# Altium footprint library Amin-Library.PcbLib: 601 footprints (part 2 of 38)
Each footprint in its own frame and in the unit in brackets; x right, y up, seen from the top. Pads: shape width x height; smd on the part's side, far side on the other; paste and mask are expansions set on the pad; w line width, h text height; cw(c..) or ccw(c..) is an arc to the next point about the centre after c.
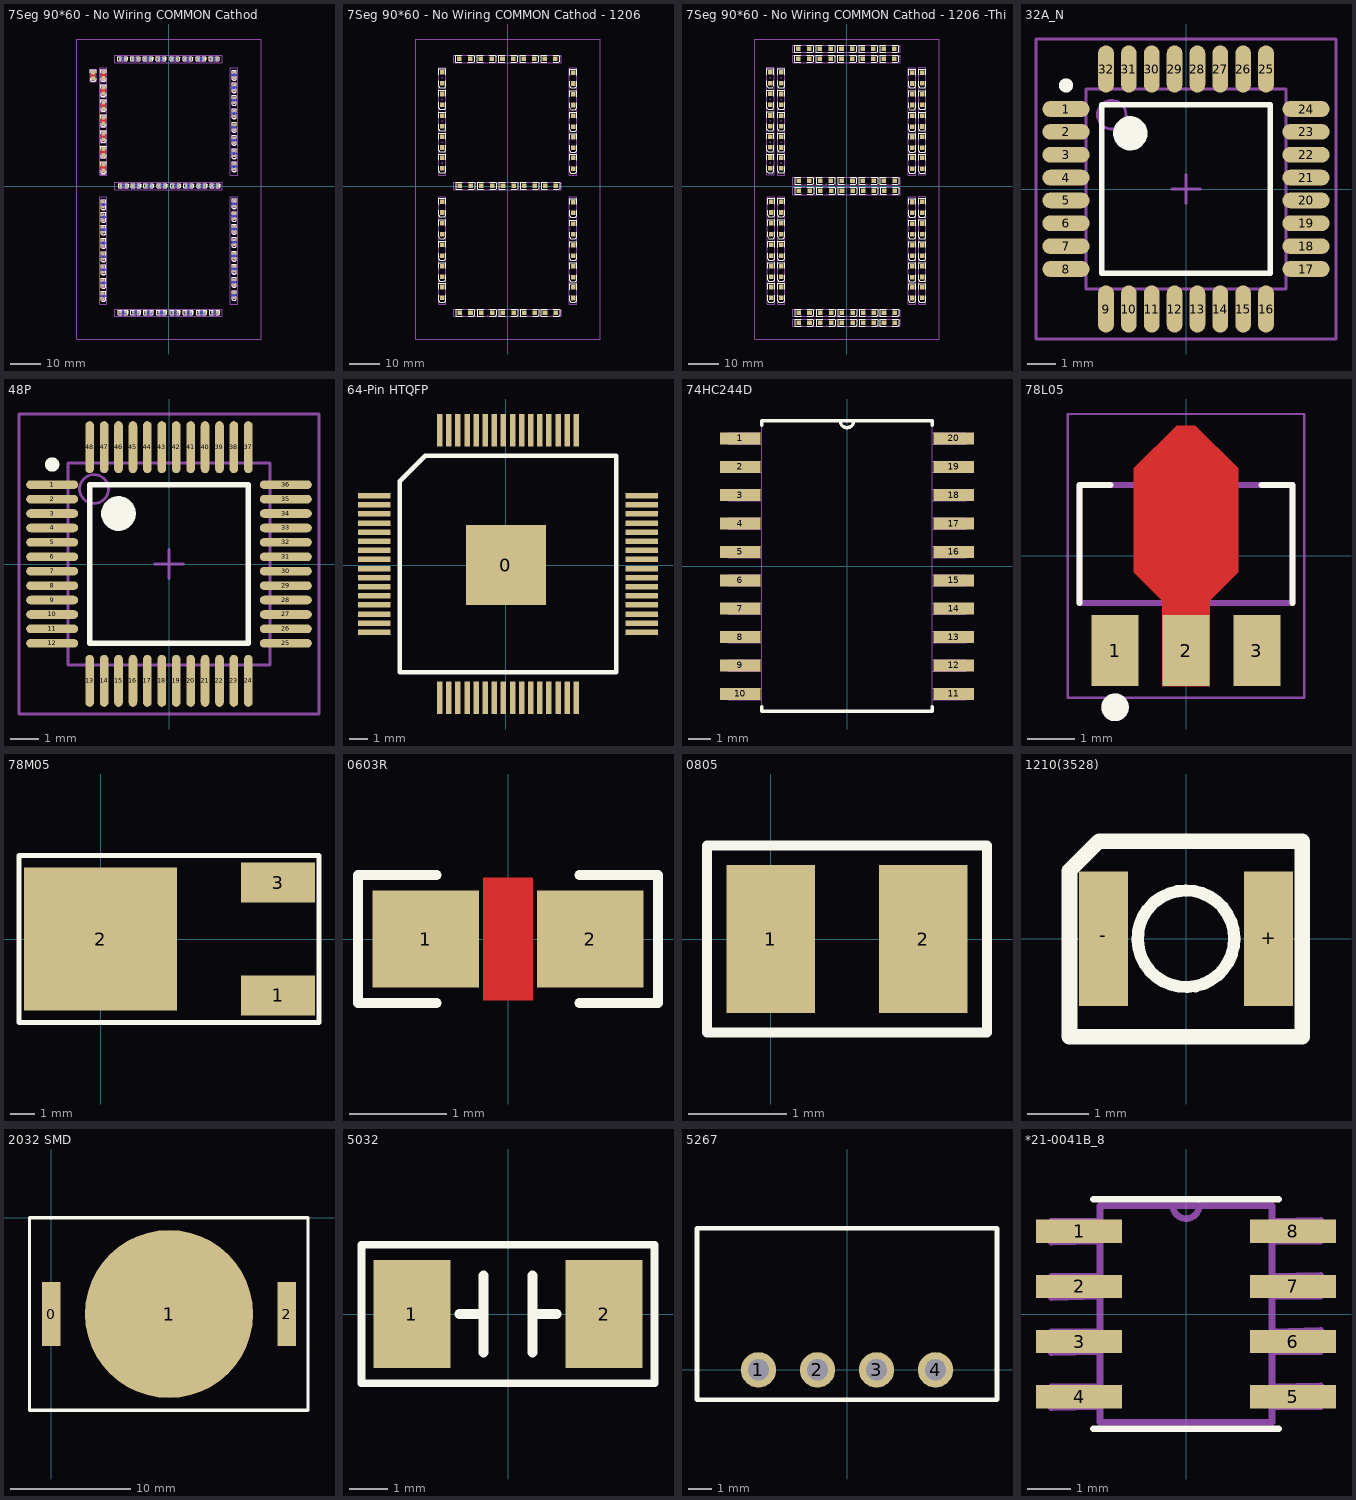
[diagram p1: the footprints below, top view; thin cyan lines are the x and y axes]

## 7Seg 90*60 - No Wiring COMMON Cathod [mm]
pads (168):
  round 0.254 on Mech15: 0(-22.352,-35.814) 0(-22.352,-22.985) 0(-22.352,-18.542) 0(-22.352,-6) 0(-22.352,7.677) 0(-22.352,20.206) 0(-22.352,25.549) 0(-22.352,36.391) 0(-22.352,-10.104) 0(-22.352,33.287) 0(-22.352,-14.224) 0(-22.352,29.167) 0(-22.351,-27.209) 0(-22.351,16.282) 0(-22.351,-31.527) 0(-22.351,12.264) 0(-15.082,40.386) 0(-14.955,-42.164) 0(-14.828,-0.889) 0(-10.978,40.386) 0(-10.851,-42.164) 0(-10.724,-0.889) 0(-6.858,40.386) 0(-6.731,-42.164) 0(-6.604,-0.889) 0(-2.54,40.386) 0(-2.413,-42.164) 0(-2.286,-0.889) 0(1.903,40.386) 0(2.03,-42.164) 0(2.157,-0.889) 0(6.127,40.386) 0(6.254,-42.163) 0(6.381,-0.888) 0(10.445,40.387) 0(10.572,-42.163) 0(10.699,-0.888) 0(14.732,40.386) 0(14.859,-42.164) 0(14.986,-0.889) 0(20.193,-35.56) 0(20.193,-22.731) 0(20.193,-18.288) 0(20.193,-5.746) 0(20.193,6.35) 0(20.193,19.179) 0(20.193,23.622) 0(20.193,36.164) 0(20.193,-9.85) 0(20.193,32.06) 0(20.193,-13.97) 0(20.193,27.94) 0(20.194,-26.955) 0(20.194,14.955) 0(20.194,-31.273) 0(20.194,10.637)
  rrect25% 0.8x0.8 smd: 2(-21.336,-34.964) 2(-21.336,-22.135) 2(-21.336,-17.692) 2(-21.336,-5.15) 2(-21.336,-9.254) 2(-21.336,-13.374) 2(-21.335,-26.359) 2(-21.335,-30.677) 3(-15.805,-41.148) 3(-11.701,-41.148) 3(-7.581,-41.148) 3(-3.263,-41.148) 3(1.18,-41.148) 3(5.404,-41.147) 3(9.722,-41.147) 3(14.009,-41.148) 4(21.209,-34.71) 4(21.209,-21.881) 4(21.209,-17.438) 4(21.209,-4.896) 4(21.209,-9) 4(21.209,-13.12) 4(21.21,-26.105) 4(21.21,-30.423) 5(-21.336,-36.664) 5(-21.336,-23.835) 5(-21.336,-19.392) 5(-21.336,-6.85) 5(-21.336,-10.954) 5(-21.336,-15.074) 5(-21.335,-28.059) 5(-21.335,-32.377) 5(-14.232,41.402) 5(-14.105,-41.148) 5(-13.978,0.127) 5(-10.128,41.402) 5(-10.001,-41.148) 5(-9.874,0.127) 5(-6.008,41.402) 5(-5.881,-41.148) 5(-5.754,0.127) 5(-1.69,41.402) 5(-1.563,-41.148) 5(-1.436,0.127) 5(2.753,41.402) 5(2.88,-41.148) 5(3.007,0.127) 5(6.977,41.402) 5(7.104,-41.147) 5(7.231,0.128) 5(11.295,41.403) 5(11.422,-41.147) 5(11.549,0.128) 5(15.582,41.402) 5(15.709,-41.148) 5(15.836,0.127) 5(21.209,-36.41) 5(21.209,-23.581) 5(21.209,-19.138) 5(21.209,-6.596) 5(21.209,5.5) 5(21.209,18.329) 5(21.209,22.772) 5(21.209,35.314) 5(21.209,-10.7) 5(21.209,31.21) 5(21.209,-14.82) 5(21.209,27.09) 5(21.21,-27.805) 5(21.21,14.105) 5(21.21,-32.123) 5(21.21,9.787) 6(21.209,7.2) 6(21.209,20.029) 6(21.209,24.472) 6(21.209,37.014) 6(21.209,32.91) 6(21.209,28.79) 6(21.21,15.805) 6(21.21,11.487) 7(-15.932,41.402) 7(-11.828,41.402) 7(-7.708,41.402) 7(-3.39,41.402) 7(1.053,41.402) 7(5.277,41.402) 7(9.595,41.403) 7(13.882,41.402) 10(-15.678,0.127) 10(-11.574,0.127) 10(-7.454,0.127) 10(-3.136,0.127) 10(1.307,0.127) 10(5.531,0.128) 10(9.849,0.128) 10(14.136,0.127)
  rrect25% 1.27x1.27 smd: 5(-24.7,35.048) 5(-21.4,5.048) 5(-21.4,10.148) 5(-21.4,15.248) 5(-21.4,20.348) 5(-21.4,25.348) 5(-21.4,30.148) 5(-21.4,35.148) 9(-24.7,36.953) 9(-21.4,6.953) 9(-21.4,12.053) 9(-21.4,17.153) 9(-21.4,22.253) 9(-21.4,27.253) 9(-21.4,32.053) 9(-21.4,37.053)
Top Layer:
  pour cut-out: -20.638,6.381 -20.638,5.619 -22.162,5.619 -22.162,6.381
  pour cut-out: -20.638,11.481 -20.638,10.719 -22.162,10.719 -22.162,11.481
  pour cut-out: -20.638,16.581 -20.638,15.819 -22.162,15.819 -22.162,16.581
  pour cut-out: -20.638,21.681 -20.638,20.919 -22.162,20.919 -22.162,21.681
  pour cut-out: -20.638,26.681 -20.638,25.919 -22.162,25.919 -22.162,26.681
  pour cut-out: -20.638,31.481 -20.638,30.719 -22.162,30.719 -22.162,31.481
  pour cut-out: -20.638,36.481 -20.638,35.719 -22.162,35.719 -22.162,36.481
  pour cut-out: -23.938,36.381 -23.938,35.619 -25.462,35.619 -25.462,36.381
Bottom Layer:
  pour cut-out: -15.582,40.902 -14.582,40.902 -14.582,41.902 -15.582,41.902
  pour cut-out: -11.478,40.902 -10.478,40.902 -10.478,41.902 -11.478,41.902
  pour cut-out: -7.358,40.902 -6.358,40.902 -6.358,41.902 -7.358,41.902
  pour cut-out: -3.04,40.902 -2.04,40.902 -2.04,41.902 -3.04,41.902
  pour cut-out: 1.403,40.902 2.403,40.902 2.403,41.902 1.403,41.902
  pour cut-out: 5.627,40.902 6.627,40.902 6.627,41.902 5.627,41.902
  pour cut-out: 9.945,40.903 10.945,40.903 10.945,41.903 9.945,41.903
  pour cut-out: 14.232,40.902 15.232,40.902 15.232,41.902 14.232,41.902
  pour cut-out: 20.709,36.664 20.709,35.664 21.709,35.664 21.709,36.664
  pour cut-out: 20.709,32.56 20.709,31.56 21.709,31.56 21.709,32.56
  pour cut-out: 20.709,28.44 20.709,27.44 21.709,27.44 21.709,28.44
  pour cut-out: 20.709,24.122 20.709,23.122 21.709,23.122 21.709,24.122
  pour cut-out: 20.709,19.679 20.709,18.679 21.709,18.679 21.709,19.679
  pour cut-out: 20.71,15.455 20.71,14.455 21.71,14.455 21.71,15.455
  pour cut-out: 20.71,11.137 20.71,10.137 21.71,10.137 21.71,11.137
  pour cut-out: 20.709,6.85 20.709,5.85 21.709,5.85 21.709,6.85
  pour cut-out: -15.328,-0.373 -14.328,-0.373 -14.328,0.627 -15.328,0.627
  pour cut-out: -11.224,-0.373 -10.224,-0.373 -10.224,0.627 -11.224,0.627
  pour cut-out: -7.104,-0.373 -6.104,-0.373 -6.104,0.627 -7.104,0.627
  pour cut-out: -2.786,-0.373 -1.786,-0.373 -1.786,0.627 -2.786,0.627
  pour cut-out: 1.657,-0.373 2.657,-0.373 2.657,0.627 1.657,0.627
  pour cut-out: 5.881,-0.372 6.881,-0.372 6.881,0.628 5.881,0.628
  pour cut-out: 10.199,-0.372 11.199,-0.372 11.199,0.628 10.199,0.628
  pour cut-out: 14.486,-0.373 15.486,-0.373 15.486,0.627 14.486,0.627
  pour cut-out: 20.709,-5.246 20.709,-6.246 21.709,-6.246 21.709,-5.246
  pour cut-out: 20.709,-9.35 20.709,-10.35 21.709,-10.35 21.709,-9.35
  pour cut-out: 20.709,-13.47 20.709,-14.47 21.709,-14.47 21.709,-13.47
  pour cut-out: 20.709,-17.788 20.709,-18.788 21.709,-18.788 21.709,-17.788
  pour cut-out: 20.709,-22.231 20.709,-23.231 21.709,-23.231 21.709,-22.231
  pour cut-out: 20.71,-26.455 20.71,-27.455 21.71,-27.455 21.71,-26.455
  pour cut-out: 20.71,-30.773 20.71,-31.773 21.71,-31.773 21.71,-30.773
  pour cut-out: 20.709,-35.06 20.709,-36.06 21.709,-36.06 21.709,-35.06
  pour cut-out: -21.836,-5.5 -21.836,-6.5 -20.836,-6.5 -20.836,-5.5
  pour cut-out: -21.836,-9.604 -21.836,-10.604 -20.836,-10.604 -20.836,-9.604
  pour cut-out: -21.836,-13.724 -21.836,-14.724 -20.836,-14.724 -20.836,-13.724
  pour cut-out: -21.836,-18.042 -21.836,-19.042 -20.836,-19.042 -20.836,-18.042
  pour cut-out: -21.836,-22.485 -21.836,-23.485 -20.836,-23.485 -20.836,-22.485
  pour cut-out: -21.835,-26.709 -21.835,-27.709 -20.835,-27.709 -20.835,-26.709
  pour cut-out: -21.835,-31.027 -21.835,-32.027 -20.835,-32.027 -20.835,-31.027
  pour cut-out: -21.836,-35.314 -21.836,-36.314 -20.836,-36.314 -20.836,-35.314
  pour cut-out: -15.455,-41.648 -14.455,-41.648 -14.455,-40.648 -15.455,-40.648
  pour cut-out: -11.351,-41.648 -10.351,-41.648 -10.351,-40.648 -11.351,-40.648
  pour cut-out: -7.231,-41.648 -6.231,-41.648 -6.231,-40.648 -7.231,-40.648
  pour cut-out: -2.913,-41.648 -1.913,-41.648 -1.913,-40.648 -2.913,-40.648
  pour cut-out: 1.53,-41.648 2.53,-41.648 2.53,-40.648 1.53,-40.648
  pour cut-out: 5.754,-41.647 6.754,-41.647 6.754,-40.647 5.754,-40.647
  pour cut-out: 10.072,-41.647 11.072,-41.647 11.072,-40.647 10.072,-40.647
  pour cut-out: 14.359,-41.648 15.359,-41.648 15.359,-40.648 14.359,-40.648
Top Overlay:
  drawing of 600 lines, arcs and shapes, not listed
Mechanical 1:
  lines w0.4: -22.601,3.514 -20.201,3.514 ; -22.601,3.57 -22.601,38.57 -20.201,38.57 -20.201,3.57 ; -22.601,-38.43 -20.201,-38.43 -20.201,-3.43 -22.601,-3.43 -22.601,-38.43 ; -17.601,-42.43 17.399,-42.43 17.399,-40.03 -17.601,-40.03 -17.601,-42.43 ; -17.601,-1.13 17.399,-1.13 17.399,1.27 -17.601,1.27 -17.601,-1.13 ; -17.601,40.17 17.399,40.17 17.399,42.57 -17.601,42.57 -17.601,40.17 ; 19.999,-38.43 19.999,-3.43 22.399,-3.43 22.399,-38.43 19.999,-38.43 ; 19.999,3.57 22.399,3.57 22.399,38.57 19.999,38.57 19.999,3.57
Mechanical 13:
  drawing of 800 lines, arcs and shapes, not listed
Mechanical 15:
  drawing of 224 lines, arcs and shapes, not listed
Mechanical 27:
  lines w0.254: -30,-49.784 30,-49.784 30,47.879 -30,47.879 -30,-49.784
3D body "LED 0603 APT1608 BLUE.STEP": height 0.75, standoff 0, extent -15.882,41.002 -14.282,41.802
3D body "LED 0603 APT1608 BLUE.STEP": height 0.75, standoff 0, extent -11.778,41.002 -10.178,41.802
3D body "LED 0603 APT1608 BLUE.STEP": height 0.75, standoff 0, extent -3.34,41.002 -1.74,41.802
3D body "LED 0603 APT1608 BLUE.STEP": height 0.75, standoff 0, extent 1.103,41.002 2.703,41.802
3D body "LED 0603 APT1608 BLUE.STEP": height 0.75, standoff 0, extent -7.658,41.002 -6.058,41.802
3D body "LED 0603 APT1608 BLUE.STEP": height 0.75, standoff 0, extent 5.327,41.002 6.927,41.802
3D body "LED 0603 APT1608 BLUE.STEP": height 0.75, standoff 0, extent 9.645,41.003 11.245,41.803
3D body "LED 0603 APT1608 BLUE.STEP": height 0.75, standoff 0, extent 13.932,41.002 15.532,41.802
3D body "LED 0603 APT1608 BLUE.STEP": height 0.75, standoff 0, extent 20.809,35.364 21.609,36.964
3D body "LED 0603 APT1608 BLUE.STEP": height 0.75, standoff 0, extent 20.809,31.26 21.609,32.86
3D body "LED 0603 APT1608 BLUE.STEP": height 0.75, standoff 0, extent 20.809,27.14 21.609,28.74
3D body "LED 0603 APT1608 BLUE.STEP": height 0.75, standoff 0, extent 20.809,22.822 21.609,24.422
3D body "LED 0603 APT1608 BLUE.STEP": height 0.75, standoff 0, extent 20.809,18.379 21.609,19.979
3D body "LED 0603 APT1608 BLUE.STEP": height 0.75, standoff 0, extent 20.809,14.155 21.609,15.755
3D body "LED 0603 APT1608 BLUE.STEP": height 0.75, standoff 0, extent 20.81,9.837 21.61,11.437
3D body "LED 0603 APT1608 BLUE.STEP": height 0.75, standoff 0, extent 20.809,5.55 21.609,7.15
3D body "LED 0603 APT1608 BLUE.STEP": height 0.75, standoff 0, extent -15.628,-0.273 -14.028,0.527
3D body "LED 0603 APT1608 BLUE.STEP": height 0.75, standoff 0, extent -11.524,-0.273 -9.924,0.527
3D body "LED 0603 APT1608 BLUE.STEP": height 0.75, standoff 0, extent -7.404,-0.273 -5.804,0.527
3D body "LED 0603 APT1608 BLUE.STEP": height 0.75, standoff 0, extent -3.086,-0.273 -1.486,0.527
3D body "LED 0603 APT1608 BLUE.STEP": height 0.75, standoff 0, extent 1.357,-0.273 2.957,0.527
3D body "LED 0603 APT1608 BLUE.STEP": height 0.75, standoff 0, extent 5.581,-0.273 7.181,0.527
3D body "LED 0603 APT1608 BLUE.STEP": height 0.75, standoff 0, extent 9.899,-0.272 11.499,0.528
3D body "LED 0603 APT1608 BLUE.STEP": height 0.75, standoff 0, extent 14.186,-0.273 15.786,0.527
3D body "LED 0603 APT1608 BLUE.STEP": height 0.75, standoff 0, extent 20.809,-6.546 21.609,-4.946
3D body "LED 0603 APT1608 BLUE.STEP": height 0.75, standoff 0, extent 20.809,-10.65 21.609,-9.05
3D body "LED 0603 APT1608 BLUE.STEP": height 0.75, standoff 0, extent 20.809,-14.77 21.609,-13.17
3D body "LED 0603 APT1608 BLUE.STEP": height 0.75, standoff 0, extent 20.809,-19.088 21.609,-17.488
3D body "LED 0603 APT1608 BLUE.STEP": height 0.75, standoff 0, extent 20.809,-23.531 21.609,-21.931
3D body "LED 0603 APT1608 BLUE.STEP": height 0.75, standoff 0, extent 20.809,-27.755 21.609,-26.155
3D body "LED 0603 APT1608 BLUE.STEP": height 0.75, standoff 0, extent 20.81,-32.073 21.61,-30.473
3D body "LED 0603 APT1608 BLUE.STEP": height 0.75, standoff 0, extent 20.809,-36.36 21.609,-34.76
3D body "LED 0603 APT1608 BLUE.STEP": height 0.75, standoff 0, extent -21.736,-6.8 -20.936,-5.2
3D body "LED 0603 APT1608 BLUE.STEP": height 0.75, standoff 0, extent -21.736,-10.904 -20.936,-9.304
3D body "LED 0603 APT1608 BLUE.STEP": height 0.75, standoff 0, extent -21.736,-15.024 -20.936,-13.424
3D body "LED 0603 APT1608 BLUE.STEP": height 0.75, standoff 0, extent -21.736,-19.342 -20.936,-17.742
3D body "LED 0603 APT1608 BLUE.STEP": height 0.75, standoff 0, extent -21.736,-23.785 -20.936,-22.185
3D body "LED 0603 APT1608 BLUE.STEP": height 0.75, standoff 0, extent -21.736,-28.009 -20.936,-26.409
3D body "LED 0603 APT1608 BLUE.STEP": height 0.75, standoff 0, extent -21.735,-32.327 -20.935,-30.727
3D body "LED 0603 APT1608 BLUE.STEP": height 0.75, standoff 0, extent -21.736,-36.614 -20.936,-35.014
3D body "LED 0603 APT1608 BLUE.STEP": height 0.75, standoff 0, extent -15.755,-41.548 -14.155,-40.748
3D body "LED 0603 APT1608 BLUE.STEP": height 0.75, standoff 0, extent -11.651,-41.548 -10.051,-40.748
3D body "LED 0603 APT1608 BLUE.STEP": height 0.75, standoff 0, extent -7.531,-41.548 -5.931,-40.748
3D body "LED 0603 APT1608 BLUE.STEP": height 0.75, standoff 0, extent -3.213,-41.548 -1.613,-40.748
3D body "LED 0603 APT1608 BLUE.STEP": height 0.75, standoff 0, extent 1.23,-41.548 2.83,-40.748
3D body "LED 0603 APT1608 BLUE.STEP": height 0.75, standoff 0, extent 5.454,-41.548 7.054,-40.748
3D body "LED 0603 APT1608 BLUE.STEP": height 0.75, standoff 0, extent 9.772,-41.547 11.372,-40.747
3D body "LED 0603 APT1608 BLUE.STEP": height 0.75, standoff 0, extent 14.059,-41.548 15.659,-40.748
3D body "everlight-17-21-0805LED-red.step": height 1.11, standoff 0, extent -22.025,5 -20.775,7
3D body "everlight-17-21-0805LED-red.step": height 1.11, standoff 0, extent -22.025,10.1 -20.775,12.1
3D body "everlight-17-21-0805LED-red.step": height 1.11, standoff 0, extent -22.025,15.2 -20.775,17.2
3D body "everlight-17-21-0805LED-red.step": height 1.11, standoff 0, extent -22.025,20.3 -20.775,22.3
3D body "everlight-17-21-0805LED-red.step": height 1.11, standoff 0, extent -22.025,25.3 -20.775,27.3
3D body "everlight-17-21-0805LED-red.step": height 1.11, standoff 0, extent -22.025,30.1 -20.775,32.1
3D body "everlight-17-21-0805LED-red.step": height 1.11, standoff 0, extent -22.025,35.1 -20.775,37.1
3D body "everlight-17-21-0805LED-red.step": height 1.11, standoff 0, extent -25.325,35 -24.075,37

## 7Seg 90*60 - No Wiring COMMON Cathod - 1206 [mm]
pads (110):
  round 0.254 on Mech15: 0(-22.352,-35.814) 0(-22.352,-22.985) 0(-22.352,-18.542) 0(-22.352,-6) 0(-22.352,-10.104) 0(-22.352,-14.224) 0(-22.351,-27.209) 0(-22.351,-31.527) 0(-14.955,-42.164) 0(-14.828,-0.889) 0(-10.851,-42.164) 0(-10.724,-0.889) 0(-6.731,-42.164) 0(-6.604,-0.889) 0(-2.413,-42.164) 0(-2.286,-0.889) 0(2.03,-42.164) 0(2.157,-0.889) 0(6.254,-42.163) 0(6.381,-0.888) 0(10.572,-42.163) 0(10.699,-0.888) 0(14.859,-42.164) 0(14.986,-0.889) 0(20.193,-35.56) 0(20.193,-22.731) 0(20.193,-18.288) 0(20.193,-5.746) 0(20.193,6.35) 0(20.193,19.179) 0(20.193,23.622) 0(20.193,36.164) 0(20.193,-9.85) 0(20.193,32.06) 0(20.193,-13.97) 0(20.193,27.94) 0(20.194,-26.955) 0(20.194,14.955) 0(20.194,-31.273) 0(20.194,10.637)
  rect 1.5x1.5 smd: 2(-21.425,-32.841) 2(-21.425,-26.041) 2(-21.425,-19.141) 2(-21.425,-12.124) 2(-21.425,-5.1) 3(-15.7,-41.2) 3(-8.676,-41.2) 3(-1.659,-41.2) 3(5.241,-41.2) 3(12.041,-41.2) 4(21.2,-32.937) 4(21.2,-26.137) 4(21.2,-19.237) 4(21.2,-12.22) 4(21.2,-5.196) 5(-21.425,-36.341) 5(-21.425,-29.541) 5(-21.425,-22.641) 5(-21.425,-15.624) 5(-21.425,-8.6) 5(-21.4,5.75) 5(-21.4,12.55) 5(-21.4,19.45) 5(-21.4,26.467) 5(-21.4,33.491) 5(-12.332,41.4) 5(-12.2,-41.2) 5(-12.178,0.1) 5(-5.308,41.4) 5(-5.176,-41.2) 5(-5.154,0.1) 5(1.709,41.4) 5(1.841,-41.2) 5(1.863,0.1) 5(8.609,41.4) 5(8.741,-41.2) 5(8.763,0.1) 5(15.409,41.4) 5(15.541,-41.2) 5(15.563,0.1) 5(21.2,-36.437) 5(21.2,-29.637) 5(21.2,-22.737) 5(21.2,-15.72) 5(21.2,-8.696) 5(21.2,5.659) 5(21.2,12.459) 5(21.2,19.359) 5(21.2,26.376) 5(21.2,33.4) 6(21.2,9.159) 6(21.2,15.959) 6(21.2,22.859) 6(21.2,29.876) 6(21.2,36.9) 7(-15.832,41.4) 7(-8.808,41.4) 7(-1.791,41.4) 7(5.109,41.4) 7(11.909,41.4) 9(-21.4,9.25) 9(-21.4,16.05) 9(-21.4,22.95) 9(-21.4,29.967) 9(-21.4,36.991) 10(-15.678,0.1) 10(-8.654,0.1) 10(-1.637,0.1) 10(5.263,0.1) 10(12.063,0.1)
Top Overlay:
  drawing of 280 lines, arcs and shapes, not listed
Mechanical 1:
  lines w0.1: -21.625,7.5 -21.225,7.5 ; -21.625,14.3 -21.225,14.3 ; -21.625,21.2 -21.225,21.2 ; -21.625,28.217 -21.225,28.217 ; -21.625,35.241 -21.225,35.241 ; -21.6,7.5 -21.2,7.5 ; -21.6,14.3 -21.2,14.3 ; -21.6,21.2 -21.2,21.2 ; -21.6,28.217 -21.2,28.217 ; -21.6,35.241 -21.2,35.241 ; -21.425,7.3 -21.425,7.7 ; -21.425,14.1 -21.425,14.5 ; -21.425,21 -21.425,21.4 ; -21.425,28.017 -21.425,28.417 ; -21.425,35.041 -21.425,35.441 ; -21.4,7.3 -21.4,7.7 ; -21.4,14.1 -21.4,14.5 ; -21.4,21 -21.4,21.4 ; -21.4,28.017 -21.4,28.417 ; -21.4,35.041 -21.4,35.441
  lines w0.4: -22.601,-38.43 -20.201,-38.43 -20.201,-3.43 -22.601,-3.43 -22.601,-38.43 ; -22.601,3.57 -20.201,3.57 -20.201,38.57 -22.601,38.57 -22.601,3.57 ; -17.601,-42.43 17.399,-42.43 17.399,-40.03 -17.601,-40.03 -17.601,-42.43 ; -17.601,-1.13 17.399,-1.13 17.399,1.27 -17.601,1.27 -17.601,-1.13 ; -17.601,40.17 17.399,40.17 17.399,42.57 -17.601,42.57 -17.601,40.17 ; 19.999,-38.43 19.999,-3.43 22.399,-3.43 22.399,-38.43 19.999,-38.43 ; 19.999,3.57 22.399,3.57 22.399,38.57 19.999,38.57 19.999,3.57
Mechanical 27:
  lines w0.254: -30,-49.784 30,-49.784 30,47.879 -30,47.879 -30,-49.784
3D body "SW3dPS-LED_SMD_SML010L_Red.STEP": height 1.36, standoff 0.01, extent -22.15,-8.509 -20.7,-5.209
3D body "SW3dPS-LED_SMD_SML010L_Red.STEP": height 1.36, standoff 0.01, extent -22.15,-15.533 -20.7,-12.233
3D body "SW3dPS-LED_SMD_SML010L_Red.STEP": height 1.36, standoff 0.01, extent -22.15,-22.55 -20.7,-19.25
3D body "SW3dPS-LED_SMD_SML010L_Red.STEP": height 1.36, standoff 0.01, extent -22.15,-29.45 -20.7,-26.15
3D body "SW3dPS-LED_SMD_SML010L_Red.STEP": height 1.36, standoff 0.01, extent -22.15,-36.25 -20.7,-32.95
3D body "SW3dPS-LED_SMD_SML010L_Red.STEP": height 1.36, standoff 0.01, extent -22.122,5.85 -20.672,9.15
3D body "SW3dPS-LED_SMD_SML010L_Red.STEP": height 1.36, standoff 0.01, extent -22.122,12.65 -20.672,15.95
3D body "SW3dPS-LED_SMD_SML010L_Red.STEP": height 1.36, standoff 0.01, extent -22.122,19.55 -20.672,22.85
3D body "SW3dPS-LED_SMD_SML010L_Red.STEP": height 1.36, standoff 0.01, extent -22.122,26.567 -20.672,29.867
3D body "SW3dPS-LED_SMD_SML010L_Red.STEP": height 1.36, standoff 0.01, extent -22.122,33.591 -20.672,36.891
3D body "SW3dPS-LED_SMD_SML010L_Red.STEP": height 1.36, standoff 0.01, extent 12.05,-41.9 15.35,-40.45
3D body "SW3dPS-LED_SMD_SML010L_Red.STEP": height 1.36, standoff 0.01, extent 5.25,-41.9 8.55,-40.45
3D body "SW3dPS-LED_SMD_SML010L_Red.STEP": height 1.36, standoff 0.01, extent -1.65,-41.9 1.65,-40.45
3D body "SW3dPS-LED_SMD_SML010L_Red.STEP": height 1.36, standoff 0.01, extent -8.667,-41.9 -5.367,-40.45
3D body "SW3dPS-LED_SMD_SML010L_Red.STEP": height 1.36, standoff 0.01, extent -15.691,-41.9 -12.391,-40.45
3D body "SW3dPS-LED_SMD_SML010L_Red.STEP": height 1.36, standoff 0.01, extent 20.5,-36.25 21.95,-32.95
3D body "SW3dPS-LED_SMD_SML010L_Red.STEP": height 1.36, standoff 0.01, extent 20.5,-29.45 21.95,-26.15
3D body "SW3dPS-LED_SMD_SML010L_Red.STEP": height 1.36, standoff 0.01, extent 20.5,-22.55 21.95,-19.25
3D body "SW3dPS-LED_SMD_SML010L_Red.STEP": height 1.36, standoff 0.01, extent 20.5,-15.533 21.95,-12.233
3D body "SW3dPS-LED_SMD_SML010L_Red.STEP": height 1.36, standoff 0.01, extent 20.5,-8.509 21.95,-5.209
3D body "SW3dPS-LED_SMD_SML010L_Red.STEP": height 1.36, standoff 0.01, extent 20.492,5.786 21.942,9.086
3D body "SW3dPS-LED_SMD_SML010L_Red.STEP": height 1.36, standoff 0.01, extent 20.492,12.586 21.942,15.886
3D body "SW3dPS-LED_SMD_SML010L_Red.STEP": height 1.36, standoff 0.01, extent 20.492,19.486 21.942,22.786
3D body "SW3dPS-LED_SMD_SML010L_Red.STEP": height 1.36, standoff 0.01, extent 20.492,26.503 21.942,29.803
3D body "SW3dPS-LED_SMD_SML010L_Red.STEP": height 1.36, standoff 0.01, extent 20.492,33.528 21.942,36.828
3D body "SW3dPS-LED_SMD_SML010L_Red.STEP": height 1.36, standoff 0.01, extent 12.05,40.7 15.35,42.15
3D body "SW3dPS-LED_SMD_SML010L_Red.STEP": height 1.36, standoff 0.01, extent 5.25,40.7 8.55,42.15
3D body "SW3dPS-LED_SMD_SML010L_Red.STEP": height 1.36, standoff 0.01, extent -1.65,40.7 1.65,42.15
3D body "SW3dPS-LED_SMD_SML010L_Red.STEP": height 1.36, standoff 0.01, extent -8.667,40.7 -5.367,42.15
3D body "SW3dPS-LED_SMD_SML010L_Red.STEP": height 1.36, standoff 0.01, extent -15.691,40.7 -12.391,42.15
3D body "SW3dPS-LED_SMD_SML010L_Red.STEP": height 1.36, standoff 0.01, extent 12.15,-0.6 15.45,0.85
3D body "SW3dPS-LED_SMD_SML010L_Red.STEP": height 1.36, standoff 0.01, extent 5.35,-0.6 8.65,0.85
3D body "SW3dPS-LED_SMD_SML010L_Red.STEP": height 1.36, standoff 0.01, extent -1.55,-0.6 1.75,0.85
3D body "SW3dPS-LED_SMD_SML010L_Red.STEP": height 1.36, standoff 0.01, extent -8.567,-0.6 -5.267,0.85
3D body "SW3dPS-LED_SMD_SML010L_Red.STEP": height 1.36, standoff 0.01, extent -15.591,-0.6 -12.291,0.85

## 7Seg 90*60 - No Wiring COMMON Cathod - 1206 -Thick [mm]
pads (220):
  round 0.254 on Mech15: 0(-25.646,-35.814) 0(-25.646,-22.985) 0(-25.646,-18.542) 0(-25.646,-6) 0(-25.646,-10.104) 0(-25.646,-14.224) 0(-25.645,-27.209) 0(-25.645,-31.527) 0(-22.352,-35.814) 0(-22.352,-22.985) 0(-22.352,-18.542) 0(-22.352,-6) 0(-22.352,-10.104) 0(-22.352,-14.224) 0(-22.351,-27.209) 0(-22.351,-31.527) 0(-14.955,-45.428) 0(-14.955,-42.164) 0(-14.904,0.713) 0(-14.828,-2.565) 0(-10.851,-45.428) 0(-10.851,-42.164) 0(-10.8,0.713) 0(-10.724,-2.565) 0(-6.731,-45.428) 0(-6.731,-42.164) 0(-6.68,0.714) 0(-6.604,-2.565) 0(-2.413,-45.428) 0(-2.413,-42.164) 0(-2.362,0.713) 0(-2.286,-2.565) 0(2.03,-45.428) 0(2.03,-42.164) 0(2.081,0.713) 0(2.157,-2.565) 0(6.254,-45.428) 0(6.254,-42.163) 0(6.305,0.714) 0(6.381,-2.565) 0(10.572,-45.428) 0(10.572,-42.163) 0(10.623,0.714) 0(10.699,-2.565) 0(14.859,-45.428) 0(14.859,-42.164) 0(14.91,0.713) 0(14.986,-2.565) 0(20.193,-35.56) 0(20.193,-22.731) 0(20.193,-18.288) 0(20.193,-5.746) 0(20.193,6.35) 0(20.193,19.179) 0(20.193,23.622) 0(20.193,36.164) 0(20.193,-9.85) 0(20.193,32.06) 0(20.193,-13.97) 0(20.193,27.94) 0(20.194,-26.955) 0(20.194,14.955) 0(20.194,-31.273) 0(20.194,10.637) 0(23.499,-35.522) 0(23.499,-22.693) 0(23.499,-18.25) 0(23.499,-5.708) 0(23.499,6.388) 0(23.499,19.217) 0(23.499,23.66) 0(23.499,36.202) 0(23.499,-9.812) 0(23.499,32.098) 0(23.499,-13.932) 0(23.499,27.978) 0(23.499,-26.917) 0(23.499,14.993) 0(23.5,-31.235) 0(23.5,10.675)
  rect 1.5x1.5 smd: 2(-24.719,-32.841) 2(-24.719,-26.041) 2(-24.719,-19.141) 2(-24.719,-12.124) 2(-24.719,-5.1) 2(-21.425,-32.841) 2(-21.425,-26.041) 2(-21.425,-19.141) 2(-21.425,-12.124) 2(-21.425,-5.1) 3(-15.7,-44.465) 3(-15.7,-41.2) 3(-8.676,-44.465) 3(-8.676,-41.2) 3(-1.659,-44.465) 3(-1.659,-41.2) 3(5.241,-44.465) 3(5.241,-41.2) 3(12.041,-44.465) 3(12.041,-41.2) 4(21.2,-32.937) 4(21.2,-26.137) 4(21.2,-19.237) 4(21.2,-12.22) 4(21.2,-5.196) 4(24.506,-32.899) 4(24.506,-26.099) 4(24.506,-19.199) 4(24.506,-12.182) 4(24.506,-5.158) 5(-24.943,5.789) 5(-24.943,12.589) 5(-24.943,19.489) 5(-24.943,26.506) 5(-24.943,33.531) 5(-24.719,-36.341) 5(-24.719,-29.541) 5(-24.719,-22.641) 5(-24.719,-15.624) 5(-24.719,-8.6) 5(-21.425,-36.341) 5(-21.425,-29.541) 5(-21.425,-22.641) 5(-21.425,-15.624) 5(-21.425,-8.6) 5(-21.4,5.75) 5(-21.4,12.55) 5(-21.4,19.45) 5(-21.4,26.467) 5(-21.4,33.491) 5(-12.334,44.715) 5(-12.332,41.4) 5(-12.254,1.702) 5(-12.2,-44.465) 5(-12.2,-41.2) 5(-12.178,-1.576) 5(-5.309,44.715) 5(-5.308,41.4) 5(-5.23,1.702) 5(-5.176,-44.465) 5(-5.176,-41.2) 5(-5.154,-1.576) 5(1.708,44.715) 5(1.709,41.4) 5(1.787,1.702) 5(1.841,-44.465) 5(1.841,-41.2) 5(1.863,-1.576) 5(8.608,44.715) 5(8.609,41.4) 5(8.687,1.702) 5(8.741,-44.465) 5(8.741,-41.2) 5(8.763,-1.576) 5(15.408,44.715) 5(15.409,41.4) 5(15.487,1.702) 5(15.541,-44.465) 5(15.541,-41.2) 5(15.563,-1.576) 5(21.2,-36.437) 5(21.2,-29.637) 5(21.2,-22.737) 5(21.2,-15.72) 5(21.2,-8.696) 5(21.2,5.659) 5(21.2,12.459) 5(21.2,19.359) 5(21.2,26.376) 5(21.2,33.4) 5(24.506,-36.399) 5(24.506,-29.599) 5(24.506,-22.699) 5(24.506,-15.682) 5(24.506,-8.658) 5(24.506,5.697) 5(24.506,12.497) 5(24.506,19.397) 5(24.506,26.414) 5(24.506,33.438) 6(21.2,9.159) 6(21.2,15.959) 6(21.2,22.859) 6(21.2,29.876) 6(21.2,36.9) 6(24.506,9.197) 6(24.506,15.997) 6(24.506,22.897) 6(24.506,29.914) 6(24.506,36.938) 7(-15.834,44.715) 7(-15.832,41.4) 7(-8.809,44.715) 7(-8.808,41.4) 7(-1.792,44.715) 7(-1.791,41.4) 7(5.108,44.715) 7(5.109,41.4) 7(11.908,44.715) 7(11.909,41.4) 9(-24.943,9.289) 9(-24.943,16.089) 9(-24.943,22.989) 9(-24.943,30.006) 9(-24.943,37.031) 9(-21.4,9.25) 9(-21.4,16.05) 9(-21.4,22.95) 9(-21.4,29.967) 9(-21.4,36.991) 10(-15.754,1.702) 10(-15.678,-1.576) 10(-8.73,1.702) 10(-8.654,-1.576) 10(-1.713,1.702) 10(-1.637,-1.576) 10(5.187,1.702) 10(5.263,-1.576) 10(11.987,1.702) 10(12.063,-1.576)
Top Overlay:
  drawing of 560 lines, arcs and shapes, not listed
Mechanical 1:
  lines w0.1: -25.168,7.539 -24.768,7.539 ; -25.168,14.339 -24.768,14.339 ; -25.168,21.239 -24.768,21.239 ; -25.168,28.256 -24.768,28.256 ; -25.168,35.281 -24.768,35.281 ; -25.143,7.539 -24.743,7.539 ; -25.143,14.339 -24.743,14.339 ; -25.143,21.239 -24.743,21.239 ; -25.143,28.256 -24.743,28.256 ; -25.143,35.281 -24.743,35.281 ; -24.968,7.339 -24.968,7.739 ; -24.968,14.139 -24.968,14.539 ; -24.968,21.039 -24.968,21.439 ; -24.968,28.056 -24.968,28.456 ; -24.968,35.081 -24.968,35.481 ; -24.943,7.339 -24.943,7.739 ; -24.943,14.139 -24.943,14.539 ; -24.943,21.039 -24.943,21.439 ; -24.943,28.056 -24.943,28.456 ; -24.943,35.081 -24.943,35.481 ; -21.625,7.5 -21.225,7.5 ; -21.625,14.3 -21.225,14.3 ; -21.625,21.2 -21.225,21.2 ; -21.625,28.217 -21.225,28.217 ; -21.625,35.241 -21.225,35.241 ; -21.6,7.5 -21.2,7.5 ; -21.6,14.3 -21.2,14.3 ; -21.6,21.2 -21.2,21.2 ; -21.6,28.217 -21.2,28.217 ; -21.6,35.241 -21.2,35.241 ; -21.425,7.3 -21.425,7.7 ; -21.425,14.1 -21.425,14.5 ; -21.425,21 -21.425,21.4 ; -21.425,28.017 -21.425,28.417 ; -21.425,35.041 -21.425,35.441 ; -21.4,7.3 -21.4,7.7 ; -21.4,14.1 -21.4,14.5 ; -21.4,21 -21.4,21.4 ; -21.4,28.017 -21.4,28.417 ; -21.4,35.041 -21.4,35.441
  lines w0.4: -26.144,3.609 -26.144,38.609 -23.744,38.609 -23.744,3.609 -26.144,3.609 ; -25.895,-38.43 -25.895,-3.43 -23.495,-3.43 -23.495,-38.43 -25.895,-38.43 ; -22.601,-38.43 -22.601,-3.43 -20.201,-3.43 -20.201,-38.43 -22.601,-38.43 ; -22.601,3.57 -22.601,38.57 -20.201,38.57 -20.201,3.57 -22.601,3.57 ; -17.677,0.472 -17.677,2.872 17.323,2.872 17.323,0.472 -17.677,0.472 ; -17.602,43.485 -17.602,45.885 17.398,45.885 17.398,43.485 -17.602,43.485 ; -17.601,-45.695 -17.601,-43.295 17.399,-43.295 17.399,-45.695 -17.601,-45.695 ; -17.601,-42.43 -17.601,-40.03 17.399,-40.03 17.399,-42.43 -17.601,-42.43 ; -17.601,-2.806 -17.601,-0.406 17.399,-0.406 17.399,-2.806 -17.601,-2.806 ; -17.601,40.17 -17.601,42.57 17.399,42.57 17.399,40.17 -17.601,40.17 ; 19.999,-38.43 22.399,-38.43 22.399,-3.43 19.999,-3.43 19.999,-38.43 ; 19.999,3.57 19.999,38.57 22.399,38.57 22.399,3.57 19.999,3.57 ; 23.305,-38.392 25.705,-38.392 25.705,-3.392 23.305,-3.392 23.305,-38.392 ; 23.305,3.608 23.305,38.608 25.705,38.608 25.705,3.608 23.305,3.608
Mechanical 27:
  lines w0.254: -30,-49.784 -30,47.879 30,47.879 30,-49.784 -30,-49.784
3D body "SW3dPS-LED_SMD_SML010L_Red.STEP": height 1.36, standoff 0.01, extent -15.667,1.002 -12.367,2.452
3D body "SW3dPS-LED_SMD_SML010L_Red.STEP": height 1.36, standoff 0.01, extent -8.643,1.002 -5.343,2.452
3D body "SW3dPS-LED_SMD_SML010L_Red.STEP": height 1.36, standoff 0.01, extent -1.626,1.002 1.674,2.452
3D body "SW3dPS-LED_SMD_SML010L_Red.STEP": height 1.36, standoff 0.01, extent 5.274,1.002 8.574,2.452
3D body "SW3dPS-LED_SMD_SML010L_Red.STEP": height 1.36, standoff 0.01, extent 12.074,1.002 15.374,2.452
3D body "SW3dPS-LED_SMD_SML010L_Red.STEP": height 1.36, standoff 0.01, extent -15.691,-45.165 -12.391,-43.715
3D body "SW3dPS-LED_SMD_SML010L_Red.STEP": height 1.36, standoff 0.01, extent -8.667,-45.165 -5.367,-43.715
3D body "SW3dPS-LED_SMD_SML010L_Red.STEP": height 1.36, standoff 0.01, extent -1.65,-45.165 1.65,-43.715
3D body "SW3dPS-LED_SMD_SML010L_Red.STEP": height 1.36, standoff 0.01, extent 5.25,-45.165 8.55,-43.715
3D body "SW3dPS-LED_SMD_SML010L_Red.STEP": height 1.36, standoff 0.01, extent 12.05,-45.165 15.35,-43.715
3D body "SW3dPS-LED_SMD_SML010L_Red.STEP": height 1.36, standoff 0.01, extent -25.444,-36.25 -23.994,-32.95
3D body "SW3dPS-LED_SMD_SML010L_Red.STEP": height 1.36, standoff 0.01, extent -25.444,-29.45 -23.994,-26.15
3D body "SW3dPS-LED_SMD_SML010L_Red.STEP": height 1.36, standoff 0.01, extent -25.444,-22.55 -23.994,-19.25
3D body "SW3dPS-LED_SMD_SML010L_Red.STEP": height 1.36, standoff 0.01, extent -25.444,-15.533 -23.994,-12.233
3D body "SW3dPS-LED_SMD_SML010L_Red.STEP": height 1.36, standoff 0.01, extent -25.444,-8.509 -23.994,-5.209
3D body "SW3dPS-LED_SMD_SML010L_Red.STEP": height 1.36, standoff 0.01, extent -15.591,-2.276 -12.291,-0.826
3D body "SW3dPS-LED_SMD_SML010L_Red.STEP": height 1.36, standoff 0.01, extent -8.567,-2.276 -5.267,-0.826
3D body "SW3dPS-LED_SMD_SML010L_Red.STEP": height 1.36, standoff 0.01, extent -1.55,-2.276 1.75,-0.826
3D body "SW3dPS-LED_SMD_SML010L_Red.STEP": height 1.36, standoff 0.01, extent 5.35,-2.276 8.65,-0.826
3D body "SW3dPS-LED_SMD_SML010L_Red.STEP": height 1.36, standoff 0.01, extent 12.15,-2.276 15.45,-0.826
3D body "SW3dPS-LED_SMD_SML010L_Red.STEP": height 1.36, standoff 0.01, extent -15.691,40.7 -12.391,42.15
3D body "SW3dPS-LED_SMD_SML010L_Red.STEP": height 1.36, standoff 0.01, extent -8.667,40.7 -5.367,42.15
3D body "SW3dPS-LED_SMD_SML010L_Red.STEP": height 1.36, standoff 0.01, extent -1.65,40.7 1.65,42.15
3D body "SW3dPS-LED_SMD_SML010L_Red.STEP": height 1.36, standoff 0.01, extent 5.25,40.7 8.55,42.15
3D body "SW3dPS-LED_SMD_SML010L_Red.STEP": height 1.36, standoff 0.01, extent 12.05,40.7 15.35,42.15
3D body "SW3dPS-LED_SMD_SML010L_Red.STEP": height 1.36, standoff 0.01, extent 20.492,33.528 21.942,36.828
3D body "SW3dPS-LED_SMD_SML010L_Red.STEP": height 1.36, standoff 0.01, extent 20.492,26.503 21.942,29.803
3D body "SW3dPS-LED_SMD_SML010L_Red.STEP": height 1.36, standoff 0.01, extent 20.492,19.486 21.942,22.786
3D body "SW3dPS-LED_SMD_SML010L_Red.STEP": height 1.36, standoff 0.01, extent 20.492,12.586 21.942,15.886
3D body "SW3dPS-LED_SMD_SML010L_Red.STEP": height 1.36, standoff 0.01, extent 20.492,5.786 21.942,9.086
3D body "SW3dPS-LED_SMD_SML010L_Red.STEP": height 1.36, standoff 0.01, extent 20.5,-8.509 21.95,-5.209
3D body "SW3dPS-LED_SMD_SML010L_Red.STEP": height 1.36, standoff 0.01, extent 20.5,-15.533 21.95,-12.233
3D body "SW3dPS-LED_SMD_SML010L_Red.STEP": height 1.36, standoff 0.01, extent 20.5,-22.55 21.95,-19.25
3D body "SW3dPS-LED_SMD_SML010L_Red.STEP": height 1.36, standoff 0.01, extent 20.5,-29.45 21.95,-26.15
3D body "SW3dPS-LED_SMD_SML010L_Red.STEP": height 1.36, standoff 0.01, extent 20.5,-36.25 21.95,-32.95
3D body "SW3dPS-LED_SMD_SML010L_Red.STEP": height 1.36, standoff 0.01, extent -15.691,-41.9 -12.391,-40.45
3D body "SW3dPS-LED_SMD_SML010L_Red.STEP": height 1.36, standoff 0.01, extent -8.667,-41.9 -5.367,-40.45
3D body "SW3dPS-LED_SMD_SML010L_Red.STEP": height 1.36, standoff 0.01, extent -1.65,-41.9 1.65,-40.45
3D body "SW3dPS-LED_SMD_SML010L_Red.STEP": height 1.36, standoff 0.01, extent 5.25,-41.9 8.55,-40.45
3D body "SW3dPS-LED_SMD_SML010L_Red.STEP": height 1.36, standoff 0.01, extent 12.05,-41.9 15.35,-40.45
3D body "SW3dPS-LED_SMD_SML010L_Red.STEP": height 1.36, standoff 0.01, extent -22.122,33.591 -20.672,36.891
3D body "SW3dPS-LED_SMD_SML010L_Red.STEP": height 1.36, standoff 0.01, extent -22.122,26.567 -20.672,29.867
3D body "SW3dPS-LED_SMD_SML010L_Red.STEP": height 1.36, standoff 0.01, extent -22.122,19.55 -20.672,22.85
3D body "SW3dPS-LED_SMD_SML010L_Red.STEP": height 1.36, standoff 0.01, extent -22.122,12.65 -20.672,15.95
3D body "SW3dPS-LED_SMD_SML010L_Red.STEP": height 1.36, standoff 0.01, extent -22.122,5.85 -20.672,9.15
3D body "SW3dPS-LED_SMD_SML010L_Red.STEP": height 1.36, standoff 0.01, extent -22.15,-36.25 -20.7,-32.95
3D body "SW3dPS-LED_SMD_SML010L_Red.STEP": height 1.36, standoff 0.01, extent -22.15,-29.45 -20.7,-26.15
3D body "SW3dPS-LED_SMD_SML010L_Red.STEP": height 1.36, standoff 0.01, extent -22.15,-22.55 -20.7,-19.25
3D body "SW3dPS-LED_SMD_SML010L_Red.STEP": height 1.36, standoff 0.01, extent -22.15,-15.533 -20.7,-12.233
3D body "SW3dPS-LED_SMD_SML010L_Red.STEP": height 1.36, standoff 0.01, extent -22.15,-8.509 -20.7,-5.209
3D body "SW3dPS-LED_SMD_SML010L_Red.STEP": height 1.36, standoff 0.01, extent -25.665,33.631 -24.215,36.931
3D body "SW3dPS-LED_SMD_SML010L_Red.STEP": height 1.36, standoff 0.01, extent -25.665,26.606 -24.215,29.906
3D body "SW3dPS-LED_SMD_SML010L_Red.STEP": height 1.36, standoff 0.01, extent -25.665,19.589 -24.215,22.889
3D body "SW3dPS-LED_SMD_SML010L_Red.STEP": height 1.36, standoff 0.01, extent -25.665,12.689 -24.215,15.989
3D body "SW3dPS-LED_SMD_SML010L_Red.STEP": height 1.36, standoff 0.01, extent -25.665,5.889 -24.215,9.189
3D body "SW3dPS-LED_SMD_SML010L_Red.STEP": height 1.36, standoff 0.01, extent 23.797,33.566 25.247,36.866
3D body "SW3dPS-LED_SMD_SML010L_Red.STEP": height 1.36, standoff 0.01, extent 23.797,26.541 25.247,29.841
3D body "SW3dPS-LED_SMD_SML010L_Red.STEP": height 1.36, standoff 0.01, extent 23.797,19.524 25.247,22.824
3D body "SW3dPS-LED_SMD_SML010L_Red.STEP": height 1.36, standoff 0.01, extent 23.797,12.624 25.247,15.924
3D body "SW3dPS-LED_SMD_SML010L_Red.STEP": height 1.36, standoff 0.01, extent 23.797,5.824 25.247,9.124
3D body "SW3dPS-LED_SMD_SML010L_Red.STEP": height 1.36, standoff 0.01, extent 23.806,-8.471 25.256,-5.171
3D body "SW3dPS-LED_SMD_SML010L_Red.STEP": height 1.36, standoff 0.01, extent 23.806,-15.495 25.256,-12.195
3D body "SW3dPS-LED_SMD_SML010L_Red.STEP": height 1.36, standoff 0.01, extent 23.806,-22.512 25.256,-19.212
3D body "SW3dPS-LED_SMD_SML010L_Red.STEP": height 1.36, standoff 0.01, extent 23.806,-29.412 25.256,-26.112
3D body "SW3dPS-LED_SMD_SML010L_Red.STEP": height 1.36, standoff 0.01, extent 23.806,-36.212 25.256,-32.912
3D body "SW3dPS-LED_SMD_SML010L_Red.STEP": height 1.36, standoff 0.01, extent -15.693,44.015 -12.393,45.465
3D body "SW3dPS-LED_SMD_SML010L_Red.STEP": height 1.36, standoff 0.01, extent -8.668,44.015 -5.368,45.465
3D body "SW3dPS-LED_SMD_SML010L_Red.STEP": height 1.36, standoff 0.01, extent -1.651,44.015 1.649,45.465
3D body "SW3dPS-LED_SMD_SML010L_Red.STEP": height 1.36, standoff 0.01, extent 5.249,44.015 8.549,45.465
3D body "SW3dPS-LED_SMD_SML010L_Red.STEP": height 1.36, standoff 0.01, extent 12.049,44.015 15.349,45.465

## 32A_N [mm] "Thin QFP, 32-Leads, Body 7x7mm, Pitch 0.8mm, IPC Medium Density"
height 1.2
pads (32):
  oval 1.65x0.55 smd: 1(-4.2,2.8) 2(-4.2,2) 3(-4.2,1.2) 4(-4.2,0.4) 5(-4.2,-0.4) 6(-4.2,-1.2) 7(-4.2,-2) 8(-4.2,-2.8) 17(4.2,-2.8) 18(4.2,-2) 19(4.2,-1.2) 20(4.2,-0.4) 21(4.2,0.4) 22(4.2,1.2) 23(4.2,2) 24(4.2,2.8)
  oval 0.55x1.65 smd: 9(-2.8,-4.2) 10(-2,-4.2) 11(-1.2,-4.2) 12(-0.4,-4.2) 13(0.4,-4.2) 14(1.2,-4.2) 15(2,-4.2) 16(2.8,-4.2) 25(2.8,4.2) 26(2,4.2) 27(1.2,4.2) 28(0.4,4.2) 29(-0.4,4.2) 30(-1.2,4.2) 31(-2,4.2) 32(-2.8,4.2)
Top Overlay:
  circle w0.25: c-4.2,3.625 r0.125
  circle w0.6: c-1.95,1.95 r0.3
  lines w0.2: -2.95,-2.95 -2.95,2.95 2.95,2.95 2.95,-2.95 -2.95,-2.95
Mechanical 13:
  circle w0.1: c-2.6,2.6 r0.5
  lines w0.1: -3.5,-3.5 -3.5,3.5 3.5,3.5 3.5,-3.5 -3.5,-3.5
Mechanical 15:
  lines w0.1: -0.5,0 0.5,0 ; 0,-0.5 0,0.5 ; -5.25,-5.25 -5.25,5.25 5.25,5.25 5.25,-5.25 -5.25,-5.25
3D body: height 1.2, standoff 0, extent -3.5,-3.5 3.5,3.5

## 48P [mm]
height 4.32
pads (48):
  oval 1.8x0.3 smd: 1(-4.05,2.75) 2(-4.05,2.25) 3(-4.05,1.75) 4(-4.05,1.25) 5(-4.05,0.75) 6(-4.05,0.25) 7(-4.05,-0.25) 8(-4.05,-0.75) 9(-4.05,-1.25) 10(-4.05,-1.75) 11(-4.05,-2.25) 12(-4.05,-2.75) 25(4.05,-2.75) 26(4.05,-2.25) 27(4.05,-1.75) 28(4.05,-1.25) 29(4.05,-0.75) 30(4.05,-0.25) 31(4.05,0.25) 32(4.05,0.75) 33(4.05,1.25) 34(4.05,1.75) 35(4.05,2.25) 36(4.05,2.75)
  oval 0.3x1.8 smd: 13(-2.75,-4.05) 14(-2.25,-4.05) 15(-1.75,-4.05) 16(-1.25,-4.05) 17(-0.75,-4.05) 18(-0.25,-4.05) 19(0.25,-4.05) 20(0.75,-4.05) 21(1.25,-4.05) 22(1.75,-4.05) 23(2.25,-4.05) 24(2.75,-4.05) 37(2.75,4.05) 38(2.25,4.05) 39(1.75,4.05) 40(1.25,4.05) 41(0.75,4.05) 42(0.25,4.05) 43(-0.25,4.05) 44(-0.75,4.05) 45(-1.25,4.05) 46(-1.75,4.05) 47(-2.25,4.05) 48(-2.75,4.05)
Top Overlay:
  circle w0.6: c-1.75,1.75 r0.3
  circle w0.25: c-4.05,3.45 r0.125
  lines w0.2: -2.75,-2.75 2.75,-2.75 2.75,2.75 -2.75,2.75 -2.75,-2.75
Mechanical 13:
  circle w0.1: c-2.6,2.6 r0.5
  lines w0.1: -3.5,-3.5 3.5,-3.5 3.5,3.5 -3.5,3.5 -3.5,-3.5
Mechanical 15:
  lines w0.1: -0.5,0 0.5,0 ; 0,-0.5 0,0.5 ; -5.2,-5.2 5.2,-5.2 5.2,5.2 -5.2,5.2 -5.2,-5.2
3D body: height 1.6, standoff 0, extent -3.5,-3.5 3.5,3.5

## 64-Pin HTQFP [mil]
pads (65):
  rect 173x173 smd: 0(0,0)
  rect 70x11.8 smd: 1(-285,150) 2(-285,130.31) 3(-285,110.63) 4(-285,90.94) 5(-285,71.26) 6(-285,51.58) 7(-285,31.89) 8(-285,12.21) 9(-285,-7.48) 10(-285,-27.16) 11(-285,-46.85) 12(-285,-66.53) 13(-285,-86.22) 14(-285,-105.91) 15(-285,-125.59) 16(-285,-145.28) 33(293.74,-145.28) 34(293.74,-125.59) 35(293.74,-105.91) 36(293.74,-86.22) 37(293.74,-66.53) 38(293.74,-46.85) 39(293.74,-27.16) 40(293.74,-7.48) 41(293.74,12.21) 42(293.74,31.89) 43(293.74,51.58) 44(293.74,71.26) 45(293.74,90.94) 46(293.74,110.63) 47(293.74,130.31) 48(293.74,150)
  rect 11.8x70 smd: 17(-143.27,-287.01) 18(-123.58,-287.01) 19(-103.9,-287.01) 20(-84.21,-287.01) 21(-64.53,-287.01) 22(-44.84,-287.01) 23(-25.16,-287.01) 24(-5.47,-287.01) 25(14.21,-287.01) 26(33.9,-287.01) 27(53.58,-287.01) 28(73.27,-287.01) 29(92.95,-287.01) 30(112.64,-287.01) 31(132.32,-287.01) 32(152.01,-287.01) 49(152.01,291.73) 50(132.32,291.73) 51(112.64,291.73) 52(92.95,291.73) 53(73.27,291.73) 54(53.58,291.73) 55(33.9,291.73) 56(14.21,291.73) 57(-5.47,291.73) 58(-25.16,291.73) 59(-44.84,291.73) 60(-64.53,291.73) 61(-84.21,291.73) 62(-103.9,291.73) 63(-123.58,291.73) 64(-143.27,291.73)
Top Overlay:
  lines w10: -230,-232.01 238.74,-232.01 238.74,236.73 -175,236.73 -230,181.73 -230,-232.01

## 74HC244D [mil] "Octal buffer/line driver - SO20 Package"
height 35.43
pads (20):
  rect 71x21 smd: 1(-188,225) 2(-188,175) 3(-188,125) 4(-188,75) 5(-188,25) 6(-188,-25) 7(-188,-75) 8(-188,-125) 9(-188,-175) 10(-188,-225) 11(188,-225) 12(188,-175) 13(188,-125) 14(188,-75) 15(188,-25) 16(188,25) 17(188,75) 18(188,125) 19(188,175) 20(188,225)
Top Overlay:
  lines w6: -150,-248 -150,-256 150,-256 150,-248 ; -150,248 -150,256 -12,256 ; 150,248 150,256 12,256 ; -12,256 ccw(c0,256) 12,256 ; -12,256 12,256
Mechanical 13:
  lines w0: -12,256 ccw(c0,256) 12,256 ; -12,256 -150,256 -150,-256 150,-256 150,256 12,256 ; -12,256 12,256 ; -210,-235 -150,-235 -150,-215 -210,-215 -210,-235 ; -210,-185 -150,-185 -150,-165 -210,-165 -210,-185 ; -210,-135 -150,-135 -150,-115 -210,-115 -210,-135 ; -210,-85 -150,-85 -150,-65 -210,-65 -210,-85 ; -210,-35 -150,-35 -150,-15 -210,-15 -210,-35 ; -210,15 -150,15 -150,35 -210,35 -210,15 ; -210,65 -150,65 -150,85 -210,85 -210,65 ; -210,115 -150,115 -150,135 -210,135 -210,115 ; -210,165 -150,165 -150,185 -210,185 -210,165 ; -210,215 -150,215 -150,235 -210,235 -210,215 ; 150,-235 210,-235 210,-215 150,-215 150,-235 ; 150,-185 210,-185 210,-165 150,-165 150,-185 ; 150,-135 210,-135 210,-115 150,-115 150,-135 ; 150,-85 210,-85 210,-65 150,-65 150,-85 ; 150,-35 210,-35 210,-15 150,-15 150,-35 ; 150,15 210,15 210,35 150,35 150,15 ; 150,65 210,65 210,85 150,85 150,65 ; 150,115 210,115 210,135 150,135 150,115 ; 150,165 210,165 210,185 150,185 150,165 ; 150,215 210,215 210,235 150,235 150,215
3D body "User Library-SOIC20.step": height 86.61, standoff -1.47, extent -199.48,-248.04 199.49,248.03

## 78L05 [mm] "SOT-89"
pads (3):
  rect 1x1.5 smd: 1(-1.5,-2) 3(1.5,-2)
  rect 1x1.5 smd paste-2 mask+0: 2(0,-2)
Top Layer:
  region: 1.1,1.85 1.1,-0.35 0.5,-0.95 0.5,-2.75 -0.5,-2.75 -0.5,-0.95 -1.1,-0.35 -1.1,1.85 -0.2,2.75 0.2,2.75
Top Overlay:
  circle w0.3: c-1.5,-3.2 r0.141
  lines w0.127: -2.25,-1 -2.25,1.5 -1.6,1.5 ; 1.6,1.5 2.25,1.5 2.25,-1
Top Paste:
  region: 1.1,1.85 1.1,-0.35 0.5,-0.95 0.5,-2.75 -0.5,-2.75 -0.5,-0.95 -1.1,-0.35 -1.1,1.85 -0.2,2.75 0.2,2.75
Top Solder:
  region: 1.2,1.85 1.2,-0.35 0.6,-0.95 0.6,-2.85 -0.6,-2.85 -0.6,-0.95 -1.2,-0.35 -1.2,1.85 -0.2,2.85 0.2,2.85
Mechanical 13:
  circle w0.3: c-1.5,-3.2 r0.141
  lines w0.127: -2.25,-1 -2.25,1.5 2.25,1.5 2.25,-1 -2.25,-1
Mechanical 15:
  lines w0.05: -2.5,-3 -2.5,3 2.5,3 2.5,-3 -2.5,-3
3D body "User Library-SOT89-3-1.step": height 1.7, standoff 0, extent -2.286,-2.352 2.413,2.098

## 78M05 [mm] "D-PAK"
height 2.38
pads (3):
  rect 3x1.6 smd: 1(7.18,-2.286) 3(7.18,2.286)
  rect 6.2x5.8 smd paste-3: 2(0,0)
Top Overlay:
  lines w0.2: 7.137,3.378 8.839,3.378 8.839,-3.378 -3.302,-3.378 -3.302,3.378 7.163,3.378
Top Paste:
  rectangle: -2.667,1.397 -1.397,2.413
  rectangle: -2.667,-0.508 -1.397,0.508
  rectangle: -2.667,-2.286 -1.397,-1.27
  rectangle: -0.635,-0.508 0.635,0.508
  rectangle: -0.635,1.397 0.635,2.413
  rectangle: -0.635,-2.286 0.635,-1.27
  rectangle: 1.515,-0.508 2.785,0.508
  rectangle: 1.515,1.397 2.785,2.413
  rectangle: 1.515,-2.286 2.785,-1.27
3D body "User Library-TO252AA.STEP": height 2.3, standoff -0.01, extent -2.7,-3.29 7,3.29

## 0603R [mm]
pads (2):
  rect 1.1x1 smd: 1(-0.85,0) 2(0.85,0)
Top Layer:
  pour cut-out: -0.254,-0.635 0.254,-0.635 0.254,0.635 -0.254,0.635
Top Overlay:
  lines w0.1: -0.737,-0.66 -1.549,-0.66 -1.549,0 -1.549,0.66 -0.737,0.66 ; 0.737,-0.66 1.549,-0.66 1.549,0 1.549,0.66 0.737,0.66
3D body "User Library-TNPW0603.STEP": height 0.45, standoff 0, extent -0.8,-0.425 0.8,0.425

## 0805 [mm]
pads (2):
  rect 0.9x1.5 smd: 1(0,0) 2(1.55,0)
Top Overlay:
  lines w0.1: -0.65,-0.95 -0.65,0.95 2.2,0.95 2.2,-0.95 -0.65,-0.95
3D body "0805.step": height 0.73, standoff -0.03, extent -0.2,-0.655 1.8,0.655

## 1210(3528) [mm]
height 1.35
pads (2):
  rect 0.8x2.2 smd mask+0: +(1.35,0) -(-1.35,0)
Top Overlay:
  lines w0.2: -0.529,0.586 ccw(c0,0) -0.509,0.604
  lines w0.254: -1.903,-1.604 1.897,-1.604 1.897,1.596 -1.42,1.596 -1.903,1.113 -1.903,-1.604

## 2032 SMD [mil]
pads (3):
  rect 60x210 smd: 0(0,-315) 2(771.65,-315)
  round 550 smd: 1(385.83,-315)
Top Overlay:
  lines w10: -70,-630 840,-630 840,0 -70,0 -70,-630

## 5032 [mm]
pads (2):
  rect 2x2.8 smd: 1(-2.5,0) 2(2.5,0)
Top Overlay:
  lines w0.2: -3.81,-1.8 -3.81,1.8 3.81,1.8 3.81,-1.8 -3.81,-1.8
  lines w0.254: -1.27,0 -0.635,0 ; -0.635,-1 -0.635,1 ; 0.635,-1 0.635,1 ; 0.635,0 1.27,0

## 5267 [mm]
pads (4):
  round 1.5 hole 0.9: 1(-3.75,0) 2(-1.25,0) 3(1.25,0) 4(3.75,0)
Top Overlay:
  lines w0.2: -6.35,-1.27 6.35,-1.27 6.35,6 -6.35,6 -6.35,-1.27

## *21-0041B_8 [mil]
pads (8):
  rect 78x21 smd: 1(-97,75) 2(-97,25) 3(-97,-25) 4(-97,-75) 5(97,-75) 6(97,-25) 7(97,25) 8(97,75)
Top Overlay:
  lines w6: -84,-104 84,-104 ; -84,104 84,104
Mechanical 4:
  lines w6: -122,-85 -122,-66 ; -122,-85 -78,-84 ; -122,-85 -122,-66 ; -122,-85 -78,-84 ; -122,-66 -78,-66 ; -122,-66 -78,-66 ; -122,-35 -122,-16 ; -122,-35 -78,-34 ; -122,-35 -122,-16 ; -122,-35 -78,-34 ; -122,-16 -78,-16 ; -122,-16 -78,-16 ; -122,15 -122,34 ; -122,15 -78,16 ; -122,15 -122,34 ; -122,15 -78,16 ; -122,34 -78,34 ; -122,34 -78,34 ; -122,65 -122,84 ; -122,65 -78,66 ; -122,65 -122,84 ; -122,65 -78,66 ; -122,84 -78,84 ; -122,84 -78,84 ; -78,-98 78,-98 ; -78,-98 -78,98 ; -78,-98 78,-98 ; -78,-98 -78,98 ; -78,-84 -78,-66 ; -78,-84 -78,-66 ; -78,-34 -78,-16 ; -78,-34 -78,-16 ; -78,16 -78,34 ; -78,16 -78,34 ; -78,66 -78,84 ; -78,66 -78,84 ; -78,98 -12,98 ; -78,98 -12,98 ; -12,98 78,98 ; -12,98 78,98 ; 78,-98 78,98 ; 78,-98 78,98 ; 78,-84 78,-66 ; 78,-84 122,-84 ; 78,-84 78,-66 ; 78,-84 122,-84 ; 78,-66 122,-65 ; 78,-66 122,-65 ; 78,-34 78,-16 ; 78,-34 122,-34 ; 78,-34 78,-16 ; 78,-34 122,-34 ; 78,-16 122,-15 ; 78,-16 122,-15 ; 78,16 78,34 ; 78,16 122,16 ; 78,16 78,34 ; 78,16 122,16 ; 78,34 122,35 ; 78,34 122,35 ; 78,66 78,84 ; 78,66 122,66 ; 78,66 78,84 ; 78,66 122,66 ; 78,84 122,85 ; 78,84 122,85 ; 122,-84 122,-65 ; 122,-84 122,-65 ; 122,-34 122,-15 ; 122,-34 122,-15 ; 122,16 122,35 ; 122,16 122,35 ; 122,66 122,85 ; 122,66 122,85 ; -12,98.08 ccw(c0,98.5) 12,98.92 cw(c0,98.5) -12,98.08